# Altium integrated library Altium_PCB_Connector.IntLib: 246 symbols (part 2 of 5)
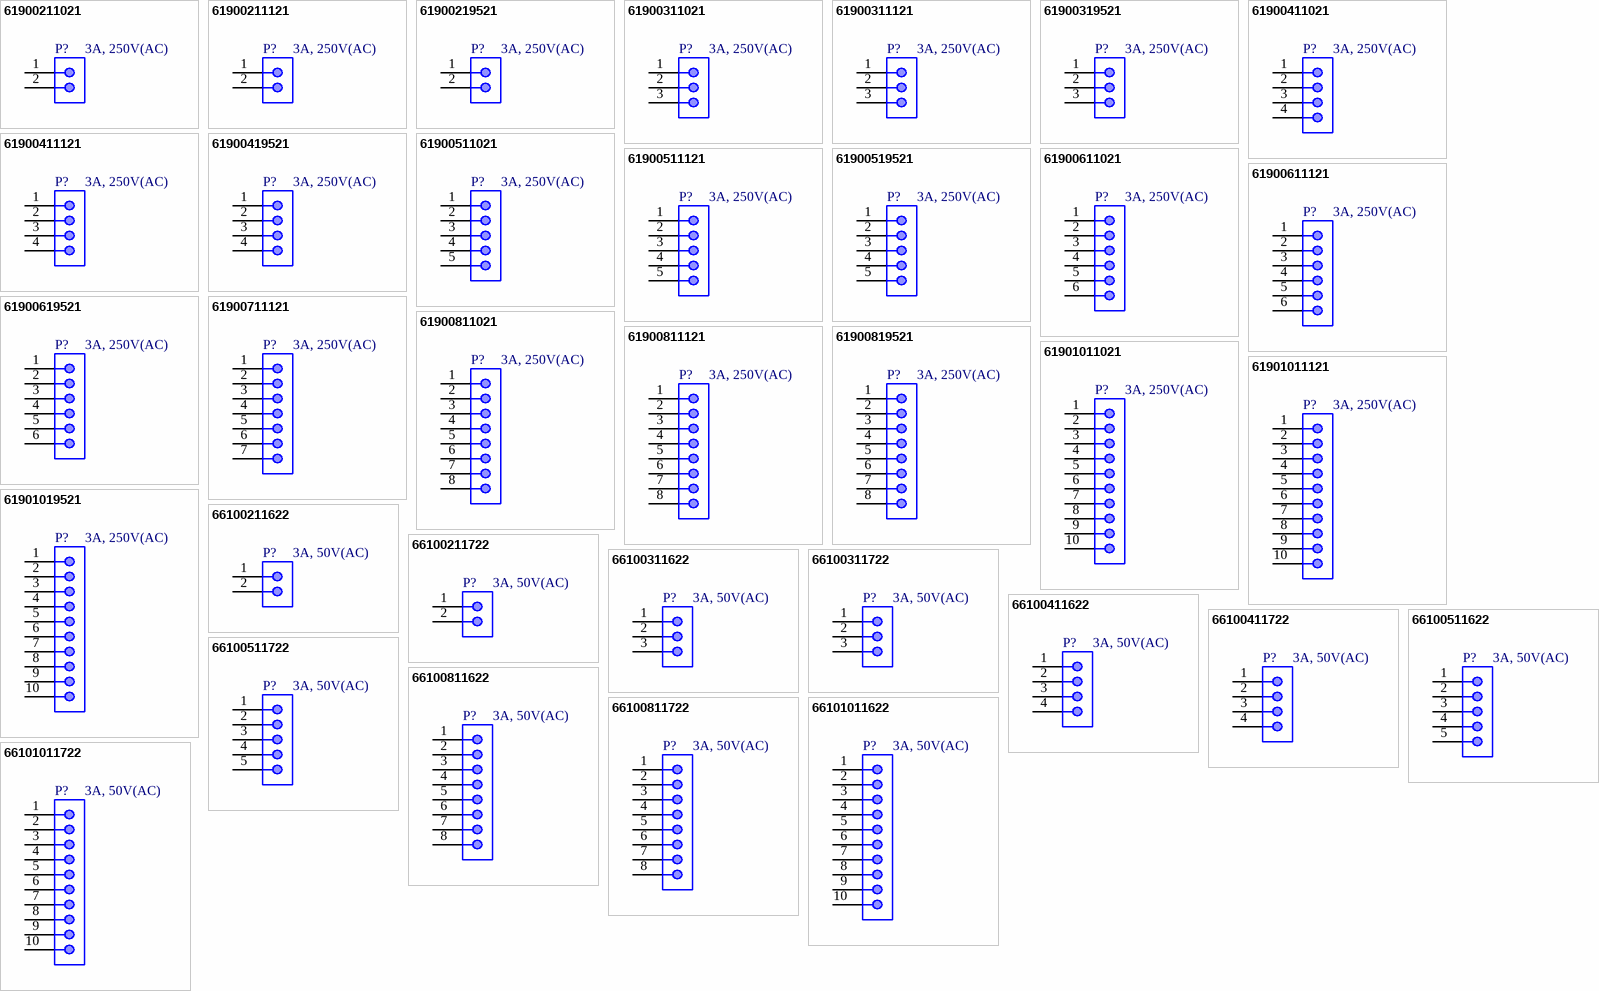
[diagram p10: symbols 61900211021 to 66101011722]

## 66101011722
designator P?, comment 3A, 50V(AC)
WR-WTB THT Male Right Angled Shrouded Header, pitch 2.54mm, 10p; Part Number: 66101011722; Manufacturer: Wurth Elektronik; Pin Number: 10; Contact Resistance: 20mOhm; Withstanding Voltage: 500VAC; Working Voltage: 50VAC; ComponentLink1Description: Datasheet; ComponentLink1URL: https://www.we-online.com/catalog/datasheet/66101011722.pdf; Pitch: 2.54mm; Packaging: Box; Gender: Male; Type: Right Angled; Rated Current: 3A; Supplier 1 URL: N/A; Supplier 2 URL: N/A; Supplier 3 URL: N/A; Value: 3A, 50V(AC); LCSC Part #: N/A; Manufacturer Part Number: 66101011722; Mount: THT; Operating Temperature Max: + 125 C; Operating Temperature Min: - 40 C; Package / Case: 10; Supplier 1: Mouser; Supplier 1 Part Number: N/A; Supplier 2: Digi-Key; Supplier 2 Part Number: N/A; Supplier 3: thegioiic; Supplier 3 Part Number: N/A
footprint 66101011722
pins: 1, 2, 3, 4, 5, 6, 7, 8, 9, 10


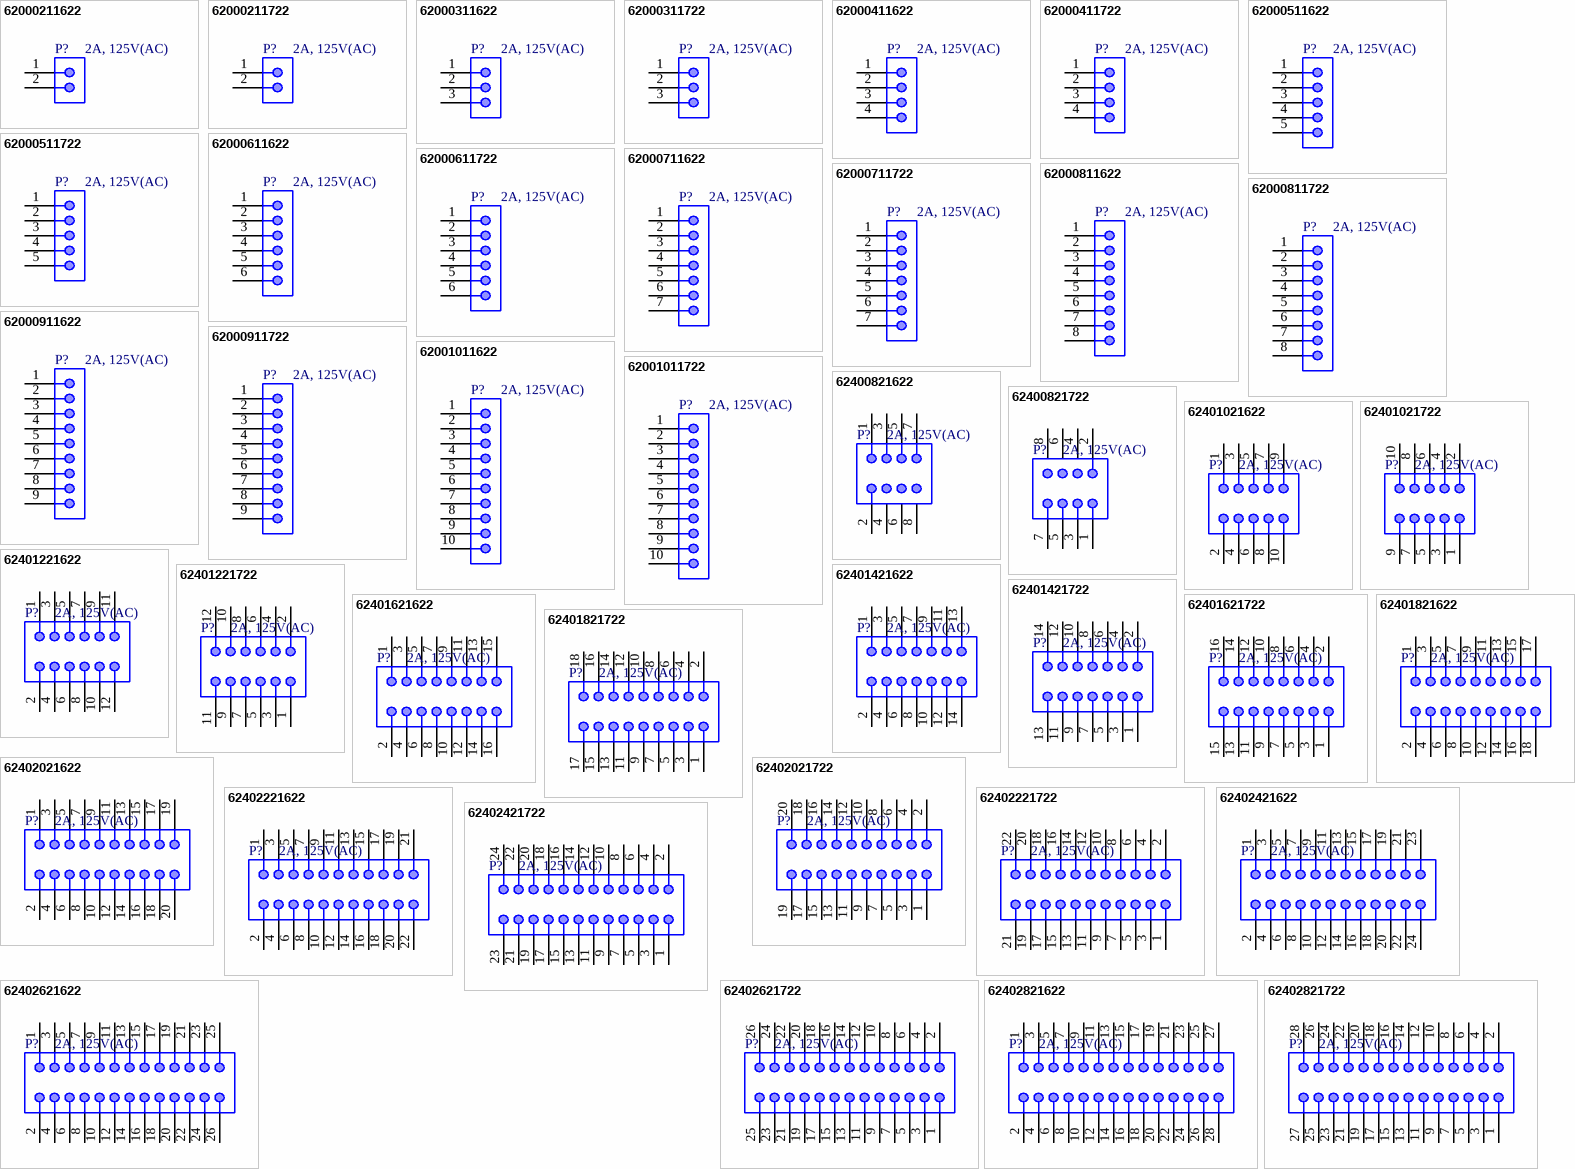
[diagram p2: symbols 62000211622 to 62402821722]

## 62000211622
designator P?, comment 2A, 125V(AC)
WR-WTB Male Vertical Shrouded Header, pitch 2mm, 2p; Part Number: 62000211622; Manufacturer: Wurth Elektronik; Pin Number: 2; Contact Resistance: 20mOhm; Withstanding Voltage: 800VAC; Working Voltage: 125VAC; ComponentLink1Description: Datasheet; ComponentLink1URL: https://www.we-online.com/catalog/datasheet/62000211622.pdf; Pitch: 2mm; Packaging: Bag; Gender: Male; Type: Vertical; Rated Current: 2A; Supplier 1 URL: https://www.mouser.vn/ProductDetail/Wurth-Elektronik/62000211622?qs=ulEaXIWI0c90wrFEMj4Fiw%3D%3D; Supplier 2 URL: N/A; Supplier 3 URL: https://www.thegioiic.com/dau-ph-2-0mm-2-chan-thang-xuyen-lo; Value: 2A, 125V(AC); LCSC Part #: N/A; Manufacturer Part Number: 62000211622; Mount: THT; Operating Temperature Max: + 85 C; Operating Temperature Min: - 25 C; Package / Case: 2; Supplier 1: Mouser; Supplier 1 Part Number: 710-62000211622; Supplier 2: Digi-Key; Supplier 2 Part Number: N/A; Supplier 3: thegioiic; Supplier 3 Part Number: N/A
footprint 62000211622
pins: 1, 2

## 62000211722
designator P?, comment 2A, 125V(AC)
WR-WTB THT Male Horizontal Shrouded Header, pitch 2mm, 2p; Part Number: 62000211722; Manufacturer: Wurth Elektronik; Pin Number: 2; Contact Resistance: 20mOhm; Withstanding Voltage: 800VAC; Working Voltage: 125VAC; ComponentLink1Description: Datasheet; ComponentLink1URL: https://www.we-online.com/catalog/datasheet/62000211722.pdf; Pitch: 2mm; Packaging: Bag; Gender: Male; Type: Horizontal; Rated Current: 2A; Supplier 1 URL: https://www.mouser.vn/ProductDetail/Wurth-Elektronik/62000211722?qs=ulEaXIWI0c%2FMXJYVzM5zuA%3D%3D; Supplier 2 URL: N/A; Supplier 3 URL: https://www.thegioiic.com/dau-ph-2-0mm-2-chan-cong-xuyen-lo; Value: 2A, 125V(AC); LCSC Part #: N/A; Manufacturer Part Number: 62000211722; Mount: THT; Operating Temperature Max: + 85 C; Operating Temperature Min: - 25 C; Package / Case: 2; Supplier 1: Mouser; Supplier 1 Part Number: 710-62000211722; Supplier 2: Digi-Key; Supplier 2 Part Number: N/A; Supplier 3: thegioiic; Supplier 3 Part Number: N/A
footprint 62000211722
pins: 1, 2

## 62000311622
designator P?, comment 2A, 125V(AC)
WR-WTB Male Vertical Shrouded Header, pitch 2mm, 3p; Part Number: 62000311622; Manufacturer: Wurth Elektronik; Pin Number: 3; Contact Resistance: 20mOhm; Withstanding Voltage: 800VAC; Working Voltage: 125VAC; ComponentLink1Description: Datasheet; ComponentLink1URL: https://www.we-online.com/catalog/datasheet/62000311622.pdf; Pitch: 2mm; Packaging: Bag; Gender: Male; Type: Vertical; Rated Current: 2A; Supplier 1 URL: N/A; Supplier 2 URL: N/A; Supplier 3 URL: https://www.thegioiic.com/dau-ph-2-0mm-3-chan-thang-xuyen-lo; Value: 2A, 125V(AC); LCSC Part #: N/A; Manufacturer Part Number: 62000311622; Mount: THT; Operating Temperature Max: + 85 C; Operating Temperature Min: - 25 C; Package / Case: 3; Supplier 1: Mouser; Supplier 1 Part Number: N/A; Supplier 2: Digi-Key; Supplier 2 Part Number: N/A; Supplier 3: thegioiic; Supplier 3 Part Number: N/A
footprint 62000311622
pins: 1, 2, 3

## 62000311722
designator P?, comment 2A, 125V(AC)
WR-WTB THT Male Horizontal Shrouded Header, pitch 2mm, 3p; Part Number: 62000311722; Manufacturer: Wurth Elektronik; Pin Number: 3; Contact Resistance: 20mOhm; Withstanding Voltage: 800VAC; Working Voltage: 125VAC; ComponentLink1Description: Datasheet; ComponentLink1URL: https://www.we-online.com/catalog/datasheet/62000311722.pdf; Pitch: 2mm; Packaging: Bag; Gender: Male; Type: Horizontal; Rated Current: 2A; Supplier 1 URL: N/A; Supplier 2 URL: N/A; Supplier 3 URL: N/A; Value: 2A, 125V(AC); LCSC Part #: N/A; Manufacturer Part Number: 62000311722; Mount: THT; Operating Temperature Max: + 85 C; Operating Temperature Min: - 25 C; Package / Case: 3; Supplier 1: Mouser; Supplier 1 Part Number: N/A; Supplier 2: Digi-Key; Supplier 2 Part Number: N/A; Supplier 3: thegioiic; Supplier 3 Part Number: N/A
footprint 62000311722
pins: 1, 2, 3

## 62000411622
designator P?, comment 2A, 125V(AC)
WR-WTB Male Vertical Shrouded Header, pitch 2mm, 4p; Part Number: 62000411622; Manufacturer: Wurth Elektronik; Pin Number: 4; Contact Resistance: 20mOhm; Withstanding Voltage: 800VAC; Working Voltage: 125VAC; ComponentLink1Description: Datasheet; ComponentLink1URL: https://www.we-online.com/catalog/datasheet/62000411622.pdf; Pitch: 2mm; Packaging: Bag; Gender: Male; Type: Vertical; Rated Current: 2A; Supplier 1 URL: https://www.mouser.vn/ProductDetail/Wurth-Elektronik/62000411622?qs=ulEaXIWI0c97uq7y%2F9KZdA%3D%3D; Supplier 2 URL: N/A; Supplier 3 URL: https://www.thegioiic.com/dau-ph-2-0mm-4-chan-thang-xuyen-lo; Value: 2A, 125V(AC); LCSC Part #: N/A; Manufacturer Part Number: 62000411622; Mount: THT; Operating Temperature Max: + 85 C; Operating Temperature Min: - 25 C; Package / Case: 4; Supplier 1: Mouser; Supplier 1 Part Number: 710-62000411622; Supplier 2: Digi-Key; Supplier 2 Part Number: N/A; Supplier 3: thegioiic; Supplier 3 Part Number: N/A
footprint 62000411622
pins: 1, 2, 3, 4

## 62000411722
designator P?, comment 2A, 125V(AC)
WR-WTB THT Male Horizontal Shrouded Header, pitch 2mm, 4p; Part Number: 62000411722; Manufacturer: Wurth Elektronik; Pin Number: 4; Contact Resistance: 20mOhm; Withstanding Voltage: 800VAC; Working Voltage: 125VAC; ComponentLink1Description: Datasheet; ComponentLink1URL: https://www.we-online.com/catalog/datasheet/62000411722.pdf; Pitch: 2mm; Packaging: Bag; Gender: Male; Type: Horizontal; Rated Current: 2A; Supplier 1 URL: https://www.mouser.vn/ProductDetail/Wurth-Elektronik/62000411722?qs=ulEaXIWI0c%2FFrQs6mYW8Wg%3D%3D; Supplier 2 URL: N/A; Supplier 3 URL: https://www.thegioiic.com/dau-ph-2-0mm-4-chan-cong-xuyen-lo; Value: 2A, 125V(AC); LCSC Part #: N/A; Manufacturer Part Number: 62000411722; Mount: THT; Operating Temperature Max: + 85 C; Operating Temperature Min: - 25 C; Package / Case: 4; Supplier 1: Mouser; Supplier 1 Part Number: 710-62000411722; Supplier 2: Digi-Key; Supplier 2 Part Number: N/A; Supplier 3: thegioiic; Supplier 3 Part Number: N/A
footprint 62000411722
pins: 1, 2, 3, 4

## 62000511622
designator P?, comment 2A, 125V(AC)
WR-WTB Male Vertical Shrouded Header, pitch 2mm, 5p; Part Number: 62000511622; Manufacturer: Wurth Elektronik; Pin Number: 5; Contact Resistance: 20mOhm; Withstanding Voltage: 800VAC; Working Voltage: 125VAC; ComponentLink1Description: Datasheet; ComponentLink1URL: https://www.we-online.com/catalog/datasheet/62000511622.pdf; Pitch: 2mm; Packaging: Bag; Gender: Male; Type: Vertical; Rated Current: 2A; Supplier 1 URL: https://www.mouser.vn/ProductDetail/Wurth-Elektronik/62000511622?qs=3Rah4i%252BhyCFehkQcqJWmLQ%3D%3D; Supplier 2 URL: N/A; Supplier 3 URL: https://www.thegioiic.com/dau-ph-2-0mm-5-chan-thang-xuyen-lo; Value: 2A, 125V(AC); LCSC Part #: N/A; Manufacturer Part Number: 62000511622; Mount: THT; Operating Temperature Max: + 85 C; Operating Temperature Min: - 25 C; Package / Case: 5; Supplier 1: Mouser; Supplier 1 Part Number: 710-62000511622; Supplier 2: Digi-Key; Supplier 2 Part Number: N/A; Supplier 3: thegioiic; Supplier 3 Part Number: N/A
footprint 62000511622
pins: 1, 2, 3, 4, 5

## 62000511722
designator P?, comment 2A, 125V(AC)
WR-WTB THT Male Horizontal Shrouded Header, pitch 2mm, 5p; Part Number: 62000511722; Manufacturer: Wurth Elektronik; Pin Number: 5; Contact Resistance: 20mOhm; Withstanding Voltage: 800VAC; Working Voltage: 125VAC; ComponentLink1Description: Datasheet; ComponentLink1URL: https://www.we-online.com/catalog/datasheet/62000511722.pdf; Pitch: 2mm; Packaging: Bag; Gender: Male; Type: Horizontal; Rated Current: 2A; Supplier 1 URL: N/A; Supplier 2 URL: N/A; Supplier 3 URL: https://www.thegioiic.com/dau-ph-2-0mm-5-chan-cong-xuyen-lo; Value: 2A, 125V(AC); LCSC Part #: N/A; Manufacturer Part Number: 62000511722; Mount: THT; Operating Temperature Max: + 85 C; Operating Temperature Min: - 25 C; Package / Case: 5; Supplier 1: Mouser; Supplier 1 Part Number: N/A; Supplier 2: Digi-Key; Supplier 2 Part Number: N/A; Supplier 3: thegioiic; Supplier 3 Part Number: N/A
footprint 62000511722
pins: 1, 2, 3, 4, 5

## 62000611622
designator P?, comment 2A, 125V(AC)
WR-WTB Male Vertical Shrouded Header, pitch 2mm, 6p; Part Number: 62000611622; Manufacturer: Wurth Elektronik; Pin Number: 6; Contact Resistance: 20mOhm; Withstanding Voltage: 800VAC; Working Voltage: 125VAC; ComponentLink1Description: Datasheet; ComponentLink1URL: https://www.we-online.com/catalog/datasheet/62000611622.pdf; Pitch: 2mm; Packaging: Bag; Gender: Male; Type: Vertical; Rated Current: 2A; Supplier 1 URL: https://www.mouser.vn/ProductDetail/Wurth-Elektronik/62000611622?qs=ulEaXIWI0c%2F38WR3e0VejA%3D%3D; Supplier 2 URL: N/A; Supplier 3 URL: https://www.thegioiic.com/dau-ph-2-0mm-6-chan-thang-xuyen-lo; Value: 2A, 125V(AC); LCSC Part #: N/A; Manufacturer Part Number: 62000611622; Mount: THT; Operating Temperature Max: + 85 C; Operating Temperature Min: - 25 C; Package / Case: 6; Supplier 1: Mouser; Supplier 1 Part Number: 710-62000611622; Supplier 2: Digi-Key; Supplier 2 Part Number: N/A; Supplier 3: thegioiic; Supplier 3 Part Number: N/A
footprint 62000611622
pins: 1, 2, 3, 4, 5, 6

## 62000611722
designator P?, comment 2A, 125V(AC)
WR-WTB THT Male Horizontal Shrouded Header, pitch 2mm, 6p; Part Number: 62000611722; Manufacturer: Wurth Elektronik; Pin Number: 6; Contact Resistance: 20mOhm; Withstanding Voltage: 800VAC; Working Voltage: 125VAC; ComponentLink1Description: Datasheet; ComponentLink1URL: https://www.we-online.com/catalog/datasheet/62000611722.pdf; Pitch: 2mm; Packaging: Bag; Gender: Male; Type: Horizontal; Rated Current: 2A; Supplier 1 URL: N/A; Supplier 2 URL: N/A; Supplier 3 URL: https://www.thegioiic.com/dau-ph-2-0mm-6-chan-cong-xuyen-lo; Value: 2A, 125V(AC); LCSC Part #: N/A; Manufacturer Part Number: 62000611722; Mount: THT; Operating Temperature Max: + 85 C; Operating Temperature Min: - 25 C; Package / Case: 6; Supplier 1: Mouser; Supplier 1 Part Number: N/A; Supplier 2: Digi-Key; Supplier 2 Part Number: N/A; Supplier 3: thegioiic; Supplier 3 Part Number: N/A
footprint 62000611722
pins: 1, 2, 3, 4, 5, 6

## 62000711622
designator P?, comment 2A, 125V(AC)
WR-WTB Male Vertical Shrouded Header, pitch 2mm, 7p; Part Number: 62000711622; Manufacturer: Wurth Elektronik; Pin Number: 7; Contact Resistance: 20mOhm; Withstanding Voltage: 800VAC; Working Voltage: 125VAC; ComponentLink1Description: Datasheet; ComponentLink1URL: https://www.we-online.com/catalog/datasheet/62000711622.pdf; Pitch: 2mm; Packaging: Bag; Gender: Male; Type: Vertical; Rated Current: 2A; Supplier 1 URL: https://www.mouser.vn/ProductDetail/Wurth-Elektronik/62000711622?qs=Z52uPhvi9VgJa7P5UNe6QA%3D%3D; Supplier 2 URL: N/A; Supplier 3 URL: https://www.thegioiic.com/dau-ph-2-0mm-7-chan-thang-xuyen-lo; Value: 2A, 125V(AC); LCSC Part #: N/A; Manufacturer Part Number: 62000711622; Mount: THT; Operating Temperature Max: + 85 C; Operating Temperature Min: - 25 C; Package / Case: 7; Supplier 1: Mouser; Supplier 1 Part Number: 710-62000711622; Supplier 2: Digi-Key; Supplier 2 Part Number: N/A; Supplier 3: thegioiic; Supplier 3 Part Number: N/A
footprint 62000711622
pins: 1, 2, 3, 4, 5, 6, 7

## 62000711722
designator P?, comment 2A, 125V(AC)
WR-WTB THT Male Horizontal Shrouded Header, pitch 2mm, 7p; Part Number: 62000711722; Manufacturer: Wurth Elektronik; Pin Number: 7; Contact Resistance: 20mOhm; Withstanding Voltage: 800VAC; Working Voltage: 125VAC; ComponentLink1Description: Datasheet; ComponentLink1URL: https://www.we-online.com/catalog/datasheet/62000711722.pdf; Pitch: 2mm; Packaging: Bag; Gender: Male; Type: Horizontal; Rated Current: 2A; Supplier 1 URL: N/A; Supplier 2 URL: N/A; Supplier 3 URL: https://www.thegioiic.com/dau-ph-2-0mm-7-chan-cong-xuyen-lo; Value: 2A, 125V(AC); LCSC Part #: N/A; Manufacturer Part Number: 62000711722; Mount: THT; Operating Temperature Max: + 85 C; Operating Temperature Min: - 25 C; Package / Case: 7; Supplier 1: Mouser; Supplier 1 Part Number: N/A; Supplier 2: Digi-Key; Supplier 2 Part Number: N/A; Supplier 3: thegioiic; Supplier 3 Part Number: N/A
footprint 62000711722
pins: 1, 2, 3, 4, 5, 6, 7

## 62000811622
designator P?, comment 2A, 125V(AC)
WR-WTB Male Vertical Shrouded Header, pitch 2mm, 8p; Part Number: 62000811622; Manufacturer: Wurth Elektronik; Pin Number: 8; Contact Resistance: 20mOhm; Withstanding Voltage: 800VAC; Working Voltage: 125VAC; ComponentLink1Description: Datasheet; ComponentLink1URL: https://www.we-online.com/catalog/datasheet/62000811622.pdf; Pitch: 2mm; Packaging: Bag; Gender: Male; Type: Vertical; Rated Current: 2A; Supplier 1 URL: N/A; Supplier 2 URL: N/A; Supplier 3 URL: https://www.thegioiic.com/dau-ph-2-0mm-8-chan-thang-xuyen-lo; Value: 2A, 125V(AC); LCSC Part #: N/A; Manufacturer Part Number: 62000811622; Mount: THT; Operating Temperature Max: + 85 C; Operating Temperature Min: - 25 C; Package / Case: 8; Supplier 1: Mouser; Supplier 1 Part Number: N/A; Supplier 2: Digi-Key; Supplier 2 Part Number: N/A; Supplier 3: thegioiic; Supplier 3 Part Number: N/A
footprint 62000811622
pins: 1, 2, 3, 4, 5, 6, 7, 8

## 62000811722
designator P?, comment 2A, 125V(AC)
WR-WTB THT Male Horizontal Shrouded Header, pitch 2mm, 8p; Part Number: 62000811722; Manufacturer: Wurth Elektronik; Pin Number: 8; Contact Resistance: 20mOhm; Withstanding Voltage: 800VAC; Working Voltage: 125VAC; ComponentLink1Description: Datasheet; ComponentLink1URL: https://www.we-online.com/catalog/datasheet/62000811722.pdf; Pitch: 2mm; Packaging: Bag; Gender: Male; Type: Horizontal; Rated Current: 2A; Supplier 1 URL: N/A; Supplier 2 URL: N/A; Supplier 3 URL: https://www.thegioiic.com/dau-ph-2-0mm-8-chan-cong-xuyen-lo; Value: 2A, 125V(AC); LCSC Part #: N/A; Manufacturer Part Number: 62000811722; Mount: THT; Operating Temperature Max: + 85 C; Operating Temperature Min: - 25 C; Package / Case: 8; Supplier 1: Mouser; Supplier 1 Part Number: N/A; Supplier 2: Digi-Key; Supplier 2 Part Number: N/A; Supplier 3: thegioiic; Supplier 3 Part Number: N/A
footprint 62000811722
pins: 1, 2, 3, 4, 5, 6, 7, 8

## 62000911622
designator P?, comment 2A, 125V(AC)
WR-WTB Male Vertical Shrouded Header, pitch 2mm, 9p; Part Number: 62000911622; Manufacturer: Wurth Elektronik; Pin Number: 9; Contact Resistance: 20mOhm; Withstanding Voltage: 800VAC; Working Voltage: 125VAC; ComponentLink1Description: Datasheet; ComponentLink1URL: https://www.we-online.com/catalog/datasheet/62000911622.pdf; Pitch: 2mm; Packaging: Bag; Gender: Male; Type: Vertical; Rated Current: 2A; Supplier 1 URL: N/A; Supplier 2 URL: N/A; Supplier 3 URL: https://www.thegioiic.com/dau-ph-2-0mm-9-chan-thang-xuyen-lo; Value: 2A, 125V(AC); LCSC Part #: N/A; Manufacturer Part Number: 62000911622; Mount: THT; Operating Temperature Max: + 85 C; Operating Temperature Min: - 25 C; Package / Case: 9; Supplier 1: Mouser; Supplier 1 Part Number: N/A; Supplier 2: Digi-Key; Supplier 2 Part Number: N/A; Supplier 3: thegioiic; Supplier 3 Part Number: N/A
footprint 62000911622
pins: 1, 2, 3, 4, 5, 6, 7, 8, 9

## 62000911722
designator P?, comment 2A, 125V(AC)
WR-WTB THT Male Horizontal Shrouded Header, pitch 2mm, 9p; Part Number: 62000911722; Manufacturer: Wurth Elektronik; Pin Number: 9; Contact Resistance: 20mOhm; Withstanding Voltage: 800VAC; Working Voltage: 125VAC; ComponentLink1Description: Datasheet; ComponentLink1URL: https://www.we-online.com/catalog/datasheet/62000911722.pdf; Pitch: 2mm; Packaging: Bag; Gender: Male; Type: Horizontal; Rated Current: 2A; Supplier 1 URL: N/A; Supplier 2 URL: N/A; Supplier 3 URL: https://www.thegioiic.com/dau-ph-2-0mm-9-chan-cong-xuyen-lo; Value: 2A, 125V(AC); LCSC Part #: N/A; Manufacturer Part Number: 62000911722; Mount: THT; Operating Temperature Max: + 85 C; Operating Temperature Min: - 25 C; Package / Case: 9; Supplier 1: Mouser; Supplier 1 Part Number: N/A; Supplier 2: Digi-Key; Supplier 2 Part Number: N/A; Supplier 3: thegioiic; Supplier 3 Part Number: N/A
footprint 62000911722
pins: 1, 2, 3, 4, 5, 6, 7, 8, 9

## 62001011622
designator P?, comment 2A, 125V(AC)
WR-WTB Male Vertical Shrouded Header, pitch 2mm, 10p; Part Number: 62001011622; Manufacturer: Wurth Elektronik; Pin Number: 10; Contact Resistance: 20mOhm; Withstanding Voltage: 800VAC; Working Voltage: 125VAC; ComponentLink1Description: Datasheet; ComponentLink1URL: https://www.we-online.com/catalog/datasheet/62001011622.pdf; Pitch: 2mm; Packaging: Bag; Gender: Male; Type: Vertical; Rated Current: 2A; Supplier 1 URL: N/A; Supplier 2 URL: N/A; Supplier 3 URL: https://www.thegioiic.com/dau-ph-2-0mm-10-chan-thang-xuyen-lo; Value: 2A, 125V(AC); LCSC Part #: N/A; Manufacturer Part Number: 62001011622; Mount: THT; Operating Temperature Max: + 85 C; Operating Temperature Min: - 25 C; Package / Case: 10; Supplier 1: Mouser; Supplier 1 Part Number: N/A; Supplier 2: Digi-Key; Supplier 2 Part Number: N/A; Supplier 3: thegioiic; Supplier 3 Part Number: N/A
footprint 62001011622
pins: 1, 2, 3, 4, 5, 6, 7, 8, 9, 10

## 62001011722
designator P?, comment 2A, 125V(AC)
WR-WTB THT Male Horizontal Shrouded Header, pitch 2mm, 10p; Part Number: 62001011722; Manufacturer: Wurth Elektronik; Pin Number: 10; Contact Resistance: 20mOhm; Withstanding Voltage: 800VAC; Working Voltage: 125VAC; ComponentLink1Description: Datasheet; ComponentLink1URL: https://www.we-online.com/catalog/datasheet/62001011722.pdf; Pitch: 2mm; Packaging: Bag; Gender: Male; Type: Horizontal; Rated Current: 2A; Supplier 1 URL: N/A; Supplier 2 URL: N/A; Supplier 3 URL: https://www.thegioiic.com/dau-ph-2-0mm-10-chan-cong-xuyen-lo; Value: 2A, 125V(AC); LCSC Part #: N/A; Manufacturer Part Number: 62001011722; Mount: THT; Operating Temperature Max: + 85 C; Operating Temperature Min: - 25 C; Package / Case: 10; Supplier 1: Mouser; Supplier 1 Part Number: N/A; Supplier 2: Digi-Key; Supplier 2 Part Number: N/A; Supplier 3: thegioiic; Supplier 3 Part Number: N/A
footprint 62001011722
pins: 1, 2, 3, 4, 5, 6, 7, 8, 9, 10

## 62400821622
designator P?, comment 2A, 125V(AC)
WR-WTB THT Male Vertical Shrouded Header with positive locking, Dual Row, pitch 2mm, 8p; Part Number: 62400821622; Manufacturer: Wurth Elektronik; Pin Number: 8; Contact Resistance: 20mOhm; Rated Current: 3A; Withstanding Voltage: 1000VAC; Working Voltage: 250VAC; ComponentLink1Description: Datasheet; ComponentLink1URL: https://www.we-online.com/catalog/datasheet/62400821622.pdf; Pitch: 2mm; Packaging: Tube; Gender: Male; Type: Vertical; Supplier 1 URL: https://www.mouser.vn/ProductDetail/Wurth-Elektronik/62400821622?qs=E2PpAYvlWVs2unmT4kcZAA%3D%3D; Supplier 2 URL: N/A; Supplier 3 URL: N/A; Value: 2A, 125V(AC); LCSC Part #: N/A; Manufacturer Part Number: 62400821622; Mount: THT; Operating Temperature Max: + 85 C; Operating Temperature Min: - 25 C; Package / Case: 8; Supplier 1: Mouser; Supplier 1 Part Number: 710-62400821622; Supplier 2: Digi-Key; Supplier 2 Part Number: N/A; Supplier 3: thegioiic; Supplier 3 Part Number: N/A
footprint 62400821622
pins: 1, 2, 3, 4, 5, 6, 7, 8

## 62400821722
designator P?, comment 2A, 125V(AC)
WR-WTB THT Male Horizontal Shrouded Header with positive locking, Dual Row, pitch 2mm, 8p; Part Number: 62400821722; Manufacturer: Wurth Elektronik; Pin Number: 8; Contact Resistance: 20mOhm; Rated Current: 3A; Withstanding Voltage: 1000VAC; Working Voltage: 250VAC; ComponentLink1Description: Datasheet; ComponentLink1URL: https://www.we-online.com/catalog/datasheet/62400821722.pdf; Pitch: 2mm; Packaging: Tube; Gender: Male; Type: Horizontal; Supplier 1 URL: https://www.mouser.vn/ProductDetail/Wurth-Elektronik/62400821722?qs=E2PpAYvlWVtG7MddBPiHNA%3D%3D; Supplier 2 URL: N/A; Supplier 3 URL: N/A; Value: 2A, 125V(AC); LCSC Part #: N/A; Manufacturer Part Number: 62400821722; Mount: THT; Operating Temperature Max: + 85 C; Operating Temperature Min: - 25 C; Package / Case: 8; Supplier 1: Mouser; Supplier 1 Part Number: 710-62400821722; Supplier 2: Digi-Key; Supplier 2 Part Number: N/A; Supplier 3: thegioiic; Supplier 3 Part Number: N/A
footprint 62400821722
pins: 1, 2, 3, 4, 5, 6, 7, 8

## 62401021622
designator P?, comment 2A, 125V(AC)
WR-WTB THT Male Vertical Shrouded Header with positive locking, Dual Row, pitch 2mm, 10p; Part Number: 62401021622; Manufacturer: Wurth Elektronik; Pin Number: 10; Contact Resistance: 20mOhm; Rated Current: 3A; Withstanding Voltage: 1000VAC; Working Voltage: 250VAC; ComponentLink1Description: Datasheet; ComponentLink1URL: https://www.we-online.com/catalog/datasheet/62401021622.pdf; Pitch: 2mm; Packaging: Tube; Gender: Male; Type: Vertical; Supplier 1 URL: https://www.mouser.vn/ProductDetail/Wurth-Elektronik/62401021622?qs=2kOmHSv6VfTyOTj9tm7OwQ%3D%3D; Supplier 2 URL: N/A; Supplier 3 URL: N/A; Value: 2A, 125V(AC); LCSC Part #: N/A; Manufacturer Part Number: 62401021622; Mount: THT; Operating Temperature Max: + 85 C; Operating Temperature Min: - 25 C; Package / Case: 10; Supplier 1: Mouser; Supplier 1 Part Number: 710-62401021622; Supplier 2: Digi-Key; Supplier 2 Part Number: N/A; Supplier 3: thegioiic; Supplier 3 Part Number: N/A
footprint 62401021622
pins: 1, 2, 3, 4, 5, 6, 7, 8, 9, 10

## 62401021722
designator P?, comment 2A, 125V(AC)
WR-WTB THT Male Horizontal Shrouded Header with positive locking, Dual Row, pitch 2mm, 10p; Part Number: 62401021722; Manufacturer: Wurth Elektronik; Pin Number: 10; Contact Resistance: 20mOhm; Rated Current: 3A; Withstanding Voltage: 1000VAC; Working Voltage: 250VAC; ComponentLink1Description: Datasheet; ComponentLink1URL: https://www.we-online.com/catalog/datasheet/62401021722.pdf; Pitch: 2mm; Packaging: Tube; Gender: Male; Type: Horizontal; Supplier 1 URL: https://www.mouser.vn/ProductDetail/Wurth-Elektronik/62401021722?qs=E2PpAYvlWVt1BydIyo7tzQ%3D%3D; Supplier 2 URL: N/A; Supplier 3 URL: N/A; Value: 2A, 125V(AC); LCSC Part #: N/A; Manufacturer Part Number: 62401021722; Mount: THT; Operating Temperature Max: + 85 C; Operating Temperature Min: - 25 C; Package / Case: 10; Supplier 1: Mouser; Supplier 1 Part Number: 710-62401021722; Supplier 2: Digi-Key; Supplier 2 Part Number: N/A; Supplier 3: thegioiic; Supplier 3 Part Number: N/A
footprint 62401021722
pins: 1, 2, 3, 4, 5, 6, 7, 8, 9, 10

## 62401221622
designator P?, comment 2A, 125V(AC)
WR-WTB THT Male Vertical Shrouded Header with positive locking, Dual Row, pitch 2mm, 12p; Part Number: 62401221622; Manufacturer: Wurth Elektronik; Pin Number: 12; Contact Resistance: 20mOhm; Rated Current: 3A; Withstanding Voltage: 1000VAC; Working Voltage: 250VAC; ComponentLink1Description: Datasheet; ComponentLink1URL: https://www.we-online.com/catalog/datasheet/62401221622.pdf; Pitch: 2mm; Packaging: Tube; Gender: Male; Type: Vertical; Supplier 1 URL: https://www.mouser.vn/ProductDetail/Wurth-Elektronik/62401221622?qs=E2PpAYvlWVtzKxOWY%2FcdIw%3D%3D; Supplier 2 URL: N/A; Supplier 3 URL: N/A; Value: 2A, 125V(AC); LCSC Part #: N/A; Manufacturer Part Number: 62401221622; Mount: THT; Operating Temperature Max: + 85 C; Operating Temperature Min: - 25 C; Package / Case: 12; Supplier 1: Mouser; Supplier 1 Part Number: 710-62401221622; Supplier 2: Digi-Key; Supplier 2 Part Number: N/A; Supplier 3: thegioiic; Supplier 3 Part Number: N/A
footprint 62401221622
pins: 1, 2, 3, 4, 5, 6, 7, 8, 9, 10, 11, 12

## 62401221722
designator P?, comment 2A, 125V(AC)
WR-WTB THT Male Horizontal Shrouded Header with positive locking, Dual Row, pitch 2mm, 12p; Part Number: 62401221722; Manufacturer: Wurth Elektronik; Pin Number: 12; Contact Resistance: 20mOhm; Rated Current: 3A; Withstanding Voltage: 1000VAC; Working Voltage: 250VAC; ComponentLink1Description: Datasheet; ComponentLink1URL: https://www.we-online.com/catalog/datasheet/62401221722.pdf; Pitch: 2mm; Packaging: Tube; Gender: Male; Type: Horizontal; Supplier 1 URL: https://www.mouser.vn/ProductDetail/Wurth-Elektronik/62401221722?qs=E2PpAYvlWVtOXg4nBTiZww%3D%3D; Supplier 2 URL: N/A; Supplier 3 URL: N/A; Value: 2A, 125V(AC); LCSC Part #: N/A; Manufacturer Part Number: 62401221722; Mount: THT; Operating Temperature Max: + 85 C; Operating Temperature Min: - 25 C; Package / Case: 12; Supplier 1: Mouser; Supplier 1 Part Number: 710-62401221722; Supplier 2: Digi-Key; Supplier 2 Part Number: N/A; Supplier 3: thegioiic; Supplier 3 Part Number: N/A
footprint 62401221722
pins: 1, 2, 3, 4, 5, 6, 7, 8, 9, 10, 11, 12

## 62401421622
designator P?, comment 2A, 125V(AC)
WR-WTB THT Male Vertical Shrouded Header with positive locking, Dual Row, pitch 2mm, 14p; Part Number: 62401421622; Manufacturer: Wurth Elektronik; Pin Number: 14; Contact Resistance: 20mOhm; Rated Current: 3A; Withstanding Voltage: 1000VAC; Working Voltage: 250VAC; ComponentLink1Description: Datasheet; ComponentLink1URL: https://www.we-online.com/catalog/datasheet/62401421622.pdf; Pitch: 2mm; Packaging: Tube; Gender: Male; Type: Vertical; Supplier 1 URL: https://www.mouser.vn/ProductDetail/Wurth-Elektronik/62401421622?qs=E2PpAYvlWVtqgqemf6MSDA%3D%3D; Supplier 2 URL: N/A; Supplier 3 URL: N/A; Value: 2A, 125V(AC); LCSC Part #: N/A; Manufacturer Part Number: 62401421622; Mount: THT; Operating Temperature Max: + 85 C; Operating Temperature Min: - 25 C; Package / Case: 14; Supplier 1: Mouser; Supplier 1 Part Number: 710-62401421622; Supplier 2: Digi-Key; Supplier 2 Part Number: N/A; Supplier 3: thegioiic; Supplier 3 Part Number: N/A
footprint 62401421622
pins: 1, 2, 3, 4, 5, 6, 7, 8, 9, 10, 11, 12, 13, 14

## 62401421722
designator P?, comment 2A, 125V(AC)
WR-WTB THT Male Horizontal Shrouded Header with positive locking, Dual Row, pitch 2mm, 14p; Part Number: 62401421722; Manufacturer: Wurth Elektronik; Pin Number: 14; Contact Resistance: 20mOhm; Rated Current: 3A; Withstanding Voltage: 1000VAC; Working Voltage: 250VAC; ComponentLink1Description: Datasheet; ComponentLink1URL: https://www.we-online.com/catalog/datasheet/62401421722.pdf; Pitch: 2mm; Packaging: Tube; Gender: Male; Type: Horizontal; Supplier 1 URL: https://www.mouser.vn/ProductDetail/Wurth-Elektronik/62401421722?qs=E2PpAYvlWVv%252BKQvrHHK3%2Fg%3D%3D; Supplier 2 URL: N/A; Supplier 3 URL: N/A; Value: 2A, 125V(AC); LCSC Part #: N/A; Manufacturer Part Number: 62401421722; Mount: THT; Operating Temperature Max: + 85 C; Operating Temperature Min: - 25 C; Package / Case: 14; Supplier 1: Mouser; Supplier 1 Part Number: 710-62401421722; Supplier 2: Digi-Key; Supplier 2 Part Number: N/A; Supplier 3: thegioiic; Supplier 3 Part Number: N/A
footprint 62401421722
pins: 1, 2, 3, 4, 5, 6, 7, 8, 9, 10, 11, 12, 13, 14

## 62401621622
designator P?, comment 2A, 125V(AC)
WR-WTB THT Male Vertical Shrouded Header with positive locking, Dual Row, pitch 2mm, 16p; Part Number: 62401621622; Manufacturer: Wurth Elektronik; Pin Number: 16; Contact Resistance: 20mOhm; Rated Current: 3A; Withstanding Voltage: 1000VAC; Working Voltage: 250VAC; ComponentLink1Description: Datasheet; ComponentLink1URL: https://www.we-online.com/catalog/datasheet/62401621622.pdf; Pitch: 2mm; Packaging: Tube; Gender: Male; Type: Vertical; Supplier 1 URL: https://www.mouser.vn/ProductDetail/Wurth-Elektronik/62401621622?qs=2kOmHSv6VfRxCf2khhpPeQ%3D%3D; Supplier 2 URL: N/A; Supplier 3 URL: N/A; Value: 2A, 125V(AC); LCSC Part #: N/A; Manufacturer Part Number: 62401621622; Mount: THT; Operating Temperature Max: + 85 C; Operating Temperature Min: - 25 C; Package / Case: 16; Supplier 1: Mouser; Supplier 1 Part Number: 710-62401621622; Supplier 2: Digi-Key; Supplier 2 Part Number: N/A; Supplier 3: thegioiic; Supplier 3 Part Number: N/A
footprint 62401621622
pins: 1, 2, 3, 4, 5, 6, 7, 8, 9, 10, 11, 12, 13, 14, 15, 16

## 62401621722
designator P?, comment 2A, 125V(AC)
WR-WTB THT Male Horizontal Shrouded Header with positive locking, Dual Row, pitch 2mm, 16p; Part Number: 62401621722; Manufacturer: Wurth Elektronik; Pin Number: 16; Contact Resistance: 20mOhm; Rated Current: 3A; Withstanding Voltage: 1000VAC; Working Voltage: 250VAC; ComponentLink1Description: Datasheet; ComponentLink1URL: https://www.we-online.com/catalog/datasheet/62401621722.pdf; Pitch: 2mm; Packaging: Tube; Gender: Male; Type: Horizontal; Supplier 1 URL: https://www.mouser.vn/ProductDetail/Wurth-Elektronik/62401621722?qs=E2PpAYvlWVvRXE%2FFvDFRow%3D%3D; Supplier 2 URL: N/A; Supplier 3 URL: N/A; Value: 2A, 125V(AC); LCSC Part #: N/A; Manufacturer Part Number: 62401621722; Mount: THT; Operating Temperature Max: + 85 C; Operating Temperature Min: - 25 C; Package / Case: 16; Supplier 1: Mouser; Supplier 1 Part Number: 710-62401621722; Supplier 2: Digi-Key; Supplier 2 Part Number: N/A; Supplier 3: thegioiic; Supplier 3 Part Number: N/A
footprint 62401621722
pins: 1, 2, 3, 4, 5, 6, 7, 8, 9, 10, 11, 12, 13, 14, 15, 16

## 62401821622
designator P?, comment 2A, 125V(AC)
WR-WTB THT Male Vertical Shrouded Header with positive locking, Dual Row, pitch 2mm, 18p; Part Number: 62401821622; Manufacturer: Wurth Elektronik; Pin Number: 18; Contact Resistance: 20mOhm; Rated Current: 3A; Withstanding Voltage: 1000VAC; Working Voltage: 250VAC; ComponentLink1Description: Datasheet; ComponentLink1URL: https://www.we-online.com/catalog/datasheet/62401821622.pdf; Pitch: 2mm; Packaging: Tube; Gender: Male; Type: Vertical; Supplier 1 URL: https://www.mouser.vn/ProductDetail/Wurth-Elektronik/62401821622?qs=E2PpAYvlWVvkaOLNzxVopg%3D%3D; Supplier 2 URL: N/A; Supplier 3 URL: N/A; Value: 2A, 125V(AC); LCSC Part #: N/A; Manufacturer Part Number: 62401821622; Mount: THT; Operating Temperature Max: + 85 C; Operating Temperature Min: - 25 C; Package / Case: 18; Supplier 1: Mouser; Supplier 1 Part Number: 710-62401821622; Supplier 2: Digi-Key; Supplier 2 Part Number: N/A; Supplier 3: thegioiic; Supplier 3 Part Number: N/A
footprint 62401821622
pins: 1, 2, 3, 4, 5, 6, 7, 8, 9, 10, 11, 12, 13, 14, 15, 16, 17, 18

## 62401821722
designator P?, comment 2A, 125V(AC)
WR-WTB THT Male Horizontal Shrouded Header with positive locking, Dual Row, pitch 2mm, 18p; Part Number: 62401821722; Manufacturer: Wurth Elektronik; Pin Number: 18; Contact Resistance: 20mOhm; Rated Current: 3A; Withstanding Voltage: 1000VAC; Working Voltage: 250VAC; ComponentLink1Description: Datasheet; ComponentLink1URL: https://www.we-online.com/catalog/datasheet/62401821722.pdf; Pitch: 2mm; Packaging: Tube; Gender: Male; Type: Horizontal; Supplier 1 URL: https://www.mouser.vn/ProductDetail/Wurth-Elektronik/62401821722?qs=E2PpAYvlWVu2hxjCWQy9bQ%3D%3D; Supplier 2 URL: N/A; Supplier 3 URL: N/A; Value: 2A, 125V(AC); LCSC Part #: N/A; Manufacturer Part Number: 62401821722; Mount: THT; Operating Temperature Max: + 85 C; Operating Temperature Min: - 25 C; Package / Case: 18; Supplier 1: Mouser; Supplier 1 Part Number: 710-62401821722; Supplier 2: Digi-Key; Supplier 2 Part Number: N/A; Supplier 3: thegioiic; Supplier 3 Part Number: N/A
footprint 62401821722
pins: 1, 2, 3, 4, 5, 6, 7, 8, 9, 10, 11, 12, 13, 14, 15, 16, 17, 18

## 62402021622
designator P?, comment 2A, 125V(AC)
WR-WTB THT Male Vertical Shrouded Header with positive locking, Dual Row, pitch 2mm, 20p; Part Number: 62402021622; Manufacturer: Wurth Elektronik; Pin Number: 20; Contact Resistance: 20mOhm; Rated Current: 3A; Withstanding Voltage: 1000VAC; Working Voltage: 250VAC; ComponentLink1Description: Datasheet; ComponentLink1URL: https://www.we-online.com/catalog/datasheet/62402021622.pdf; Pitch: 2mm; Packaging: Tube; Gender: Male; Type: Vertical; Supplier 1 URL: https://www.mouser.vn/ProductDetail/Wurth-Elektronik/62402021622?qs=E2PpAYvlWVv8kSSRPw9mNw%3D%3D; Supplier 2 URL: N/A; Supplier 3 URL: N/A; Value: 2A, 125V(AC); LCSC Part #: N/A; Manufacturer Part Number: 62402021622; Mount: THT; Operating Temperature Max: + 85 C; Operating Temperature Min: - 25 C; Package / Case: 20; Supplier 1: Mouser; Supplier 1 Part Number: 710-62402021622; Supplier 2: Digi-Key; Supplier 2 Part Number: N/A; Supplier 3: thegioiic; Supplier 3 Part Number: N/A
footprint 62402021622
pins: 1, 2, 3, 4, 5, 6, 7, 8, 9, 10, 11, 12, 13, 14, 15, 16, 17, 18, 19, 20

## 62402021722
designator P?, comment 2A, 125V(AC)
WR-WTB THT Male Horizontal Shrouded Header with positive locking, Dual Row, pitch 2mm, 20p; Part Number: 62402021722; Manufacturer: Wurth Elektronik; Pin Number: 20; Contact Resistance: 20mOhm; Rated Current: 3A; Withstanding Voltage: 1000VAC; Working Voltage: 250VAC; ComponentLink1Description: Datasheet; ComponentLink1URL: https://www.we-online.com/catalog/datasheet/62402021722.pdf; Pitch: 2mm; Packaging: Tube; Gender: Male; Type: Horizontal; Supplier 1 URL: https://www.mouser.vn/ProductDetail/Wurth-Elektronik/62402021722?qs=E2PpAYvlWVu2YNk7Qrqh5Q%3D%3D; Supplier 2 URL: N/A; Supplier 3 URL: N/A; Value: 2A, 125V(AC); LCSC Part #: N/A; Manufacturer Part Number: 62402021722; Mount: THT; Operating Temperature Max: + 85 C; Operating Temperature Min: - 25 C; Package / Case: 20; Supplier 1: Mouser; Supplier 1 Part Number: 710-62402021722; Supplier 2: Digi-Key; Supplier 2 Part Number: N/A; Supplier 3: thegioiic; Supplier 3 Part Number: N/A
footprint 62402021722
pins: 1, 2, 3, 4, 5, 6, 7, 8, 9, 10, 11, 12, 13, 14, 15, 16, 17, 18, 19, 20

## 62402221622
designator P?, comment 2A, 125V(AC)
WR-WTB THT Male Vertical Shrouded Header with positive locking, Dual Row, pitch 2mm, 22p; Part Number: 62402221622; Manufacturer: Wurth Elektronik; Pin Number: 22; Contact Resistance: 20mOhm; Rated Current: 3A; Withstanding Voltage: 1000VAC; Working Voltage: 250VAC; ComponentLink1Description: Datasheet; ComponentLink1URL: https://www.we-online.com/catalog/datasheet/62402221622.pdf; Pitch: 2mm; Packaging: Tube; Gender: Male; Type: Vertical; Supplier 1 URL: https://www.mouser.vn/ProductDetail/Wurth-Elektronik/62402221622?qs=E2PpAYvlWVtDGxljqrkKNw%3D%3D; Supplier 2 URL: N/A; Supplier 3 URL: N/A; Value: 2A, 125V(AC); LCSC Part #: N/A; Manufacturer Part Number: 62402221622; Mount: THT; Operating Temperature Max: + 85 C; Operating Temperature Min: - 25 C; Package / Case: 22; Supplier 1: Mouser; Supplier 1 Part Number: 710-62402221622; Supplier 2: Digi-Key; Supplier 2 Part Number: N/A; Supplier 3: thegioiic; Supplier 3 Part Number: N/A
footprint 62402221622
pins: 1, 2, 3, 4, 5, 6, 7, 8, 9, 10, 11, 12, 13, 14, 15, 16, 17, 18, 19, 20, 21, 22

## 62402221722
designator P?, comment 2A, 125V(AC)
WR-WTB THT Male Horizontal Shrouded Header with positive locking, Dual Row, pitch 2mm, 22p; Part Number: 62402221722; Manufacturer: Wurth Elektronik; Pin Number: 22; Contact Resistance: 20mOhm; Rated Current: 3A; Withstanding Voltage: 1000VAC; Working Voltage: 250VAC; ComponentLink1Description: Datasheet; ComponentLink1URL: https://www.we-online.com/catalog/datasheet/62402221722.pdf; Pitch: 2mm; Packaging: Tube; Gender: Male; Type: Horizontal; Supplier 1 URL: https://www.mouser.vn/ProductDetail/Wurth-Elektronik/62402221722?qs=E2PpAYvlWVtyqDTXHrgPXQ%3D%3D; Supplier 2 URL: N/A; Supplier 3 URL: N/A; Value: 2A, 125V(AC); LCSC Part #: N/A; Manufacturer Part Number: 62402221722; Mount: THT; Operating Temperature Max: + 85 C; Operating Temperature Min: - 25 C; Package / Case: 22; Supplier 1: Mouser; Supplier 1 Part Number: 710-62402221722; Supplier 2: Digi-Key; Supplier 2 Part Number: N/A; Supplier 3: thegioiic; Supplier 3 Part Number: N/A
footprint 62402221722
pins: 1, 2, 3, 4, 5, 6, 7, 8, 9, 10, 11, 12, 13, 14, 15, 16, 17, 18, 19, 20, 21, 22

## 62402421622
designator P?, comment 2A, 125V(AC)
WR-WTB THT Male Vertical Shrouded Header with positive locking, Dual Row, pitch 2mm, 24p; Part Number: 62402421622; Manufacturer: Wurth Elektronik; Pin Number: 24; Contact Resistance: 20mOhm; Rated Current: 3A; Withstanding Voltage: 1000VAC; Working Voltage: 250VAC; ComponentLink1Description: Datasheet; ComponentLink1URL: https://www.we-online.com/catalog/datasheet/62402421622.pdf; Pitch: 2mm; Packaging: Tube; Gender: Male; Type: Vertical; Supplier 1 URL: https://www.mouser.vn/ProductDetail/Wurth-Elektronik/62402421622?qs=2kOmHSv6VfRhYo9kVBRY3g%3D%3D; Supplier 2 URL: N/A; Supplier 3 URL: N/A; Value: 2A, 125V(AC); LCSC Part #: N/A; Manufacturer Part Number: 62402421622; Mount: THT; Operating Temperature Max: + 85 C; Operating Temperature Min: - 25 C; Package / Case: 24; Supplier 1: Mouser; Supplier 1 Part Number: 710-62402421622; Supplier 2: Digi-Key; Supplier 2 Part Number: N/A; Supplier 3: thegioiic; Supplier 3 Part Number: N/A
footprint 62402421622
pins: 1, 2, 3, 4, 5, 6, 7, 8, 9, 10, 11, 12, 13, 14, 15, 16, 17, 18, 19, 20, 21, 22, 23, 24

## 62402421722
designator P?, comment 2A, 125V(AC)
WR-WTB THT Male Horizontal Shrouded Header with positive locking, Dual Row, pitch 2mm, 24p; Part Number: 62402421722; Manufacturer: Wurth Elektronik; Pin Number: 24; Contact Resistance: 20mOhm; Rated Current: 3A; Withstanding Voltage: 1000VAC; Working Voltage: 250VAC; ComponentLink1Description: Datasheet; ComponentLink1URL: https://www.we-online.com/catalog/datasheet/62402421722.pdf; Pitch: 2mm; Packaging: Tube; Gender: Male; Type: Horizontal; Supplier 1 URL: https://www.mouser.vn/ProductDetail/Wurth-Elektronik/62402421722?qs=E2PpAYvlWVvbvo6YmSySiQ%3D%3D; Supplier 2 URL: N/A; Supplier 3 URL: N/A; Value: 2A, 125V(AC); LCSC Part #: N/A; Manufacturer Part Number: 62402421722; Mount: THT; Operating Temperature Max: + 85 C; Operating Temperature Min: - 25 C; Package / Case: 24; Supplier 1: Mouser; Supplier 1 Part Number: 710-62402421722; Supplier 2: Digi-Key; Supplier 2 Part Number: N/A; Supplier 3: thegioiic; Supplier 3 Part Number: N/A
footprint 62402421722
pins: 1, 2, 3, 4, 5, 6, 7, 8, 9, 10, 11, 12, 13, 14, 15, 16, 17, 18, 19, 20, 21, 22, 23, 24

## 62402621622
designator P?, comment 2A, 125V(AC)
WR-WTB THT Male Vertical Shrouded Header with positive locking, Dual Row, pitch 2mm, 26p; Part Number: 62402621622; Manufacturer: Wurth Elektronik; Pin Number: 26; Contact Resistance: 20mOhm; Rated Current: 3A; Withstanding Voltage: 1000VAC; Working Voltage: 250VAC; ComponentLink1Description: Datasheet; ComponentLink1URL: https://www.we-online.com/catalog/datasheet/62402621622.pdf; Pitch: 2mm; Packaging: Tube; Gender: Male; Type: Vertical; Supplier 1 URL: https://www.mouser.vn/ProductDetail/Wurth-Elektronik/62402421622?qs=2kOmHSv6VfRhYo9kVBRY3g%3D%3D; Supplier 2 URL: N/A; Supplier 3 URL: N/A; Value: 2A, 125V(AC); LCSC Part #: N/A; Manufacturer Part Number: 62402621622; Mount: THT; Operating Temperature Max: + 85 C; Operating Temperature Min: - 25 C; Package / Case: 26; Supplier 1: Mouser; Supplier 1 Part Number: 710-62402421622; Supplier 2: Digi-Key; Supplier 2 Part Number: N/A; Supplier 3: thegioiic; Supplier 3 Part Number: N/A
footprint 62402621622
pins: 1, 2, 3, 4, 5, 6, 7, 8, 9, 10, 11, 12, 13, 14, 15, 16, 17, 18, 19, 20, 21, 22, 23, 24, 25, 26

## 62402621722
designator P?, comment 2A, 125V(AC)
WR-WTB THT Male Horizontal Shrouded Header with positive locking, Dual Row, pitch 2mm, 26p; Part Number: 62402621722; Manufacturer: Wurth Elektronik; Pin Number: 26; Contact Resistance: 20mOhm; Rated Current: 3A; Withstanding Voltage: 1000VAC; Working Voltage: 250VAC; ComponentLink1Description: Datasheet; ComponentLink1URL: https://www.we-online.com/catalog/datasheet/62402621722.pdf; Pitch: 2mm; Packaging: Tube; Gender: Male; Type: Horizontal; Supplier 1 URL: https://www.mouser.vn/ProductDetail/Wurth-Elektronik/62402621722?qs=E2PpAYvlWVtxgm9luf8cXA%3D%3D; Supplier 2 URL: N/A; Supplier 3 URL: N/A; Value: 2A, 125V(AC); LCSC Part #: N/A; Manufacturer Part Number: 62402621722; Mount: THT; Operating Temperature Max: + 85 C; Operating Temperature Min: - 25 C; Package / Case: 26; Supplier 1: Mouser; Supplier 1 Part Number: 710-62402621722; Supplier 2: Digi-Key; Supplier 2 Part Number: N/A; Supplier 3: thegioiic; Supplier 3 Part Number: N/A
footprint 62402621722
pins: 1, 2, 3, 4, 5, 6, 7, 8, 9, 10, 11, 12, 13, 14, 15, 16, 17, 18, 19, 20, 21, 22, 23, 24, 25, 26

## 62402821622
designator P?, comment 2A, 125V(AC)
WR-WTB THT Male Vertical Shrouded Header with positive locking, Dual Row, pitch 2mm, 28p; Part Number: 62402821622; Manufacturer: Wurth Elektronik; Pin Number: 28; Contact Resistance: 20mOhm; Rated Current: 3A; Withstanding Voltage: 1000VAC; Working Voltage: 250VAC; ComponentLink1Description: Datasheet; ComponentLink1URL: https://www.we-online.com/catalog/datasheet/62402821622.pdf; Pitch: 2mm; Packaging: Tube; Gender: Male; Type: Vertical; Supplier 1 URL: https://www.mouser.vn/ProductDetail/Wurth-Elektronik/62402821622?qs=E2PpAYvlWVv641KfY3U4Cg%3D%3D; Supplier 2 URL: N/A; Supplier 3 URL: N/A; Value: 2A, 125V(AC); LCSC Part #: N/A; Manufacturer Part Number: 62402821622; Mount: THT; Operating Temperature Max: + 85 C; Operating Temperature Min: - 25 C; Package / Case: 28; Supplier 1: Mouser; Supplier 1 Part Number: 710-62402821622; Supplier 2: Digi-Key; Supplier 2 Part Number: N/A; Supplier 3: thegioiic; Supplier 3 Part Number: N/A
footprint 62402821622
pins: 1, 2, 3, 4, 5, 6, 7, 8, 9, 10, 11, 12, 13, 14, 15, 16, 17, 18, 19, 20, 21, 22, 23, 24, 25, 26, 27, 28

## 62402821722
designator P?, comment 2A, 125V(AC)
WR-WTB THT Male Horizontal Shrouded Header with positive locking, Dual Row, pitch 2mm, 28p; Part Number: 62402821722; Manufacturer: Wurth Elektronik; Pin Number: 28; Contact Resistance: 20mOhm; Rated Current: 3A; Withstanding Voltage: 1000VAC; Working Voltage: 250VAC; ComponentLink1Description: Datasheet; ComponentLink1URL: https://www.we-online.com/catalog/datasheet/62402821722.pdf; Pitch: 2mm; Packaging: Tube; Gender: Male; Type: Horizontal; Supplier 1 URL: https://www.mouser.vn/ProductDetail/Wurth-Elektronik/62402821722?qs=E2PpAYvlWVv3ea%252BrjDfuiw%3D%3D; Supplier 2 URL: N/A; Supplier 3 URL: N/A; Value: 2A, 125V(AC); LCSC Part #: N/A; Manufacturer Part Number: 62402821722; Mount: THT; Operating Temperature Max: + 85 C; Operating Temperature Min: - 25 C; Package / Case: 28; Supplier 1: Mouser; Supplier 1 Part Number: 710-62402821722; Supplier 2: Digi-Key; Supplier 2 Part Number: N/A; Supplier 3: thegioiic; Supplier 3 Part Number: N/A
footprint 62402821722
pins: 1, 2, 3, 4, 5, 6, 7, 8, 9, 10, 11, 12, 13, 14, 15, 16, 17, 18, 19, 20, 21, 22, 23, 24, 25, 26, 27, 28

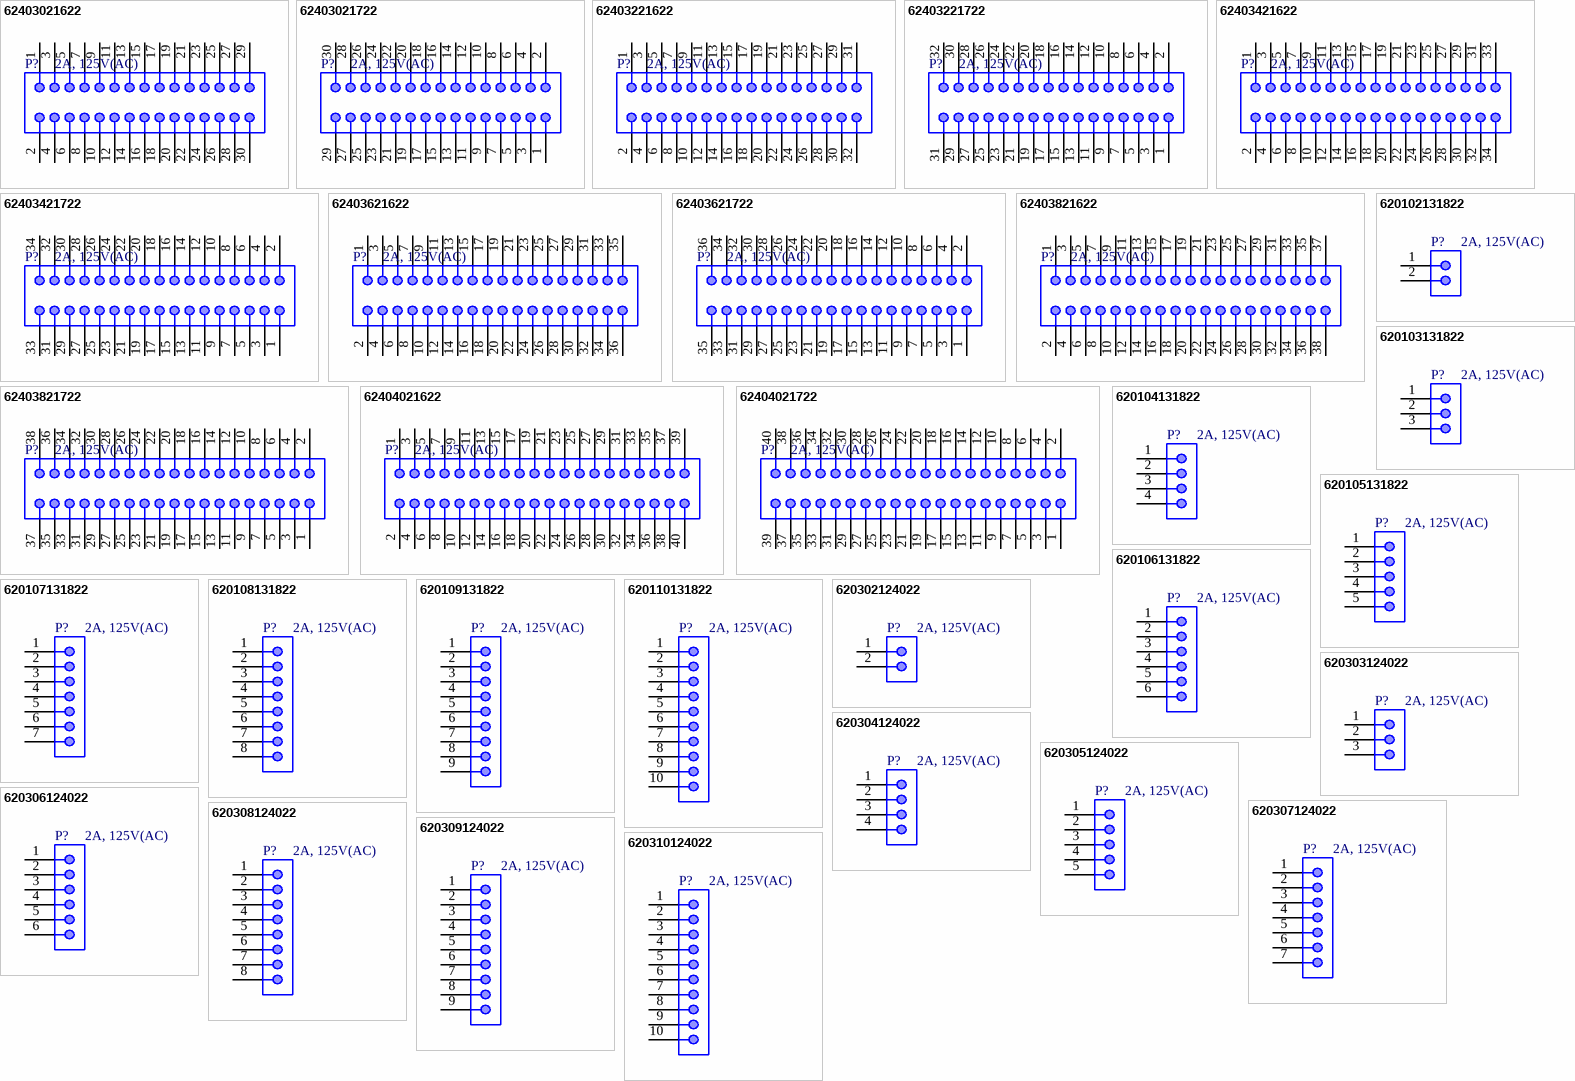
[diagram p3: symbols 62403021622 to 620310124022]

## 62403021622
designator P?, comment 2A, 125V(AC)
WR-WTB THT Male Vertical Shrouded Header with positive locking, Dual Row, pitch 2mm, 30p; Part Number: 62403021622; Manufacturer: Wurth Elektronik; Pin Number: 30; Contact Resistance: 20mOhm; Rated Current: 3A; Withstanding Voltage: 1000VAC; Working Voltage: 250VAC; ComponentLink1Description: Datasheet; ComponentLink1URL: https://www.we-online.com/catalog/datasheet/62403021622.pdf; Pitch: 2mm; Packaging: Tube; Gender: Male; Type: Vertical; Supplier 1 URL: https://www.mouser.vn/ProductDetail/Wurth-Elektronik/62403021622?qs=E2PpAYvlWVt5zQplzHgovA%3D%3D; Supplier 2 URL: N/A; Supplier 3 URL: N/A; Value: 2A, 125V(AC); LCSC Part #: N/A; Manufacturer Part Number: 62403021622; Mount: THT; Operating Temperature Max: + 85 C; Operating Temperature Min: - 25 C; Package / Case: 30; Supplier 1: Mouser; Supplier 1 Part Number: 710-62403021622; Supplier 2: Digi-Key; Supplier 2 Part Number: N/A; Supplier 3: thegioiic; Supplier 3 Part Number: N/A
footprint 62403021622
pins: 1, 2, 3, 4, 5, 6, 7, 8, 9, 10, 11, 12, 13, 14, 15, 16, 17, 18, 19, 20, 21, 22, 23, 24, 25, 26, 27, 28, 29, 30

## 62403021722
designator P?, comment 2A, 125V(AC)
WR-WTB THT Male Horizontal Shrouded Header with positive locking, Dual Row, pitch 2mm, 30p; Part Number: 62403021722; Manufacturer: Wurth Elektronik; Pin Number: 30; Contact Resistance: 20mOhm; Rated Current: 3A; Withstanding Voltage: 1000VAC; Working Voltage: 250VAC; ComponentLink1Description: Datasheet; ComponentLink1URL: https://www.we-online.com/catalog/datasheet/62403021722.pdf; Pitch: 2mm; Packaging: Tube; Gender: Male; Type: Horizontal; Supplier 1 URL: https://www.mouser.vn/ProductDetail/Wurth-Elektronik/62403021722?qs=E2PpAYvlWVtn05zHywk89g%3D%3D; Supplier 2 URL: N/A; Supplier 3 URL: N/A; Value: 2A, 125V(AC); LCSC Part #: N/A; Manufacturer Part Number: 62403021722; Mount: THT; Operating Temperature Max: + 85 C; Operating Temperature Min: - 25 C; Package / Case: 30; Supplier 1: Mouser; Supplier 1 Part Number: 710-62403021722; Supplier 2: Digi-Key; Supplier 2 Part Number: N/A; Supplier 3: thegioiic; Supplier 3 Part Number: N/A
footprint 62403021722
pins: 1, 2, 3, 4, 5, 6, 7, 8, 9, 10, 11, 12, 13, 14, 15, 16, 17, 18, 19, 20, 21, 22, 23, 24, 25, 26, 27, 28, 29, 30

## 62403221622
designator P?, comment 2A, 125V(AC)
WR-WTB THT Male Vertical Shrouded Header with positive locking, Dual Row, pitch 2mm, 32p; Part Number: 62403221622; Manufacturer: Wurth Elektronik; Pin Number: 32; Contact Resistance: 20mOhm; Rated Current: 3A; Withstanding Voltage: 1000VAC; Working Voltage: 250VAC; ComponentLink1Description: Datasheet; ComponentLink1URL: https://www.we-online.com/catalog/datasheet/62403221622.pdf; Pitch: 2mm; Packaging: Tube; Gender: Male; Type: Vertical; Supplier 1 URL: https://www.mouser.vn/ProductDetail/Wurth-Elektronik/62403221622?qs=2kOmHSv6VfTqmjxA2Zf7fA%3D%3D; Supplier 2 URL: N/A; Supplier 3 URL: N/A; Value: 2A, 125V(AC); LCSC Part #: N/A; Manufacturer Part Number: 62403221622; Mount: THT; Operating Temperature Max: + 85 C; Operating Temperature Min: - 25 C; Package / Case: 32; Supplier 1: Mouser; Supplier 1 Part Number: 710-62403221622; Supplier 2: Digi-Key; Supplier 2 Part Number: N/A; Supplier 3: thegioiic; Supplier 3 Part Number: N/A
footprint 62403221622
pins: 1, 2, 3, 4, 5, 6, 7, 8, 9, 10, 11, 12, 13, 14, 15, 16, 17, 18, 19, 20, 21, 22, 23, 24, 25, 26, 27, 28, 29, 30, 31, 32

## 62403221722
designator P?, comment 2A, 125V(AC)
WR-WTB THT Male Horizontal Shrouded Header with positive locking, Dual Row, pitch 2mm, 32p; Part Number: 62403221722; Manufacturer: Wurth Elektronik; Pin Number: 32; Contact Resistance: 20mOhm; Rated Current: 3A; Withstanding Voltage: 1000VAC; Working Voltage: 250VAC; ComponentLink1Description: Datasheet; ComponentLink1URL: https://www.we-online.com/catalog/datasheet/62403221722.pdf; Pitch: 2mm; Packaging: Tube; Gender: Male; Type: Horizontal; Supplier 1 URL: https://www.mouser.vn/ProductDetail/Wurth-Elektronik/62403221722?qs=E2PpAYvlWVtsAhmCM%252BjOAQ%3D%3D; Supplier 2 URL: N/A; Supplier 3 URL: N/A; Value: 2A, 125V(AC); LCSC Part #: N/A; Manufacturer Part Number: 62403221722; Mount: THT; Operating Temperature Max: + 85 C; Operating Temperature Min: - 25 C; Package / Case: 32; Supplier 1: Mouser; Supplier 1 Part Number: 710-62403221722; Supplier 2: Digi-Key; Supplier 2 Part Number: N/A; Supplier 3: thegioiic; Supplier 3 Part Number: N/A
footprint 62403221722
pins: 1, 2, 3, 4, 5, 6, 7, 8, 9, 10, 11, 12, 13, 14, 15, 16, 17, 18, 19, 20, 21, 22, 23, 24, 25, 26, 27, 28, 29, 30, 31, 32

## 62403421622
designator P?, comment 2A, 125V(AC)
WR-WTB THT Male Vertical Shrouded Header with positive locking, Dual Row, pitch 2mm, 34p; Part Number: 62403421622; Manufacturer: Wurth Elektronik; Pin Number: 34; Contact Resistance: 20mOhm; Rated Current: 3A; Withstanding Voltage: 1000VAC; Working Voltage: 250VAC; ComponentLink1Description: Datasheet; ComponentLink1URL: https://www.we-online.com/catalog/datasheet/62403421622.pdf; Pitch: 2mm; Packaging: Tube; Gender: Male; Type: Vertical; Supplier 1 URL: https://www.mouser.vn/ProductDetail/Wurth-Elektronik/62403421622?qs=E2PpAYvlWVtc1VgVK8vY4g%3D%3D; Supplier 2 URL: N/A; Supplier 3 URL: N/A; Value: 2A, 125V(AC); LCSC Part #: N/A; Manufacturer Part Number: 62403421622; Mount: THT; Operating Temperature Max: + 85 C; Operating Temperature Min: - 25 C; Package / Case: 34; Supplier 1: Mouser; Supplier 1 Part Number: 710-62403421622; Supplier 2: Digi-Key; Supplier 2 Part Number: N/A; Supplier 3: thegioiic; Supplier 3 Part Number: N/A
footprint 62403421622
pins: 1, 2, 3, 4, 5, 6, 7, 8, 9, 10, 11, 12, 13, 14, 15, 16, 17, 18, 19, 20, 21, 22, 23, 24, 25, 26, 27, 28, 29, 30, 31, 32, 33, 34

## 62403421722
designator P?, comment 2A, 125V(AC)
WR-WTB THT Male Horizontal Shrouded Header with positive locking, Dual Row, pitch 2mm, 34p; Part Number: 62403421722; Manufacturer: Wurth Elektronik; Pin Number: 34; Contact Resistance: 20mOhm; Rated Current: 3A; Withstanding Voltage: 1000VAC; Working Voltage: 250VAC; ComponentLink1Description: Datasheet; ComponentLink1URL: https://www.we-online.com/catalog/datasheet/62403421722.pdf; Pitch: 2mm; Packaging: Tube; Gender: Male; Type: Horizontal; Supplier 1 URL: https://www.mouser.vn/ProductDetail/Wurth-Elektronik/62403421722?qs=E2PpAYvlWVuzbyQa%252BDEmaQ%3D%3D; Supplier 2 URL: N/A; Supplier 3 URL: N/A; Value: 2A, 125V(AC); LCSC Part #: N/A; Manufacturer Part Number: 62403421722; Mount: THT; Operating Temperature Max: + 85 C; Operating Temperature Min: - 25 C; Package / Case: 34; Supplier 1: Mouser; Supplier 1 Part Number: 710-62403421722; Supplier 2: Digi-Key; Supplier 2 Part Number: N/A; Supplier 3: thegioiic; Supplier 3 Part Number: N/A
footprint 62403421722
pins: 1, 2, 3, 4, 5, 6, 7, 8, 9, 10, 11, 12, 13, 14, 15, 16, 17, 18, 19, 20, 21, 22, 23, 24, 25, 26, 27, 28, 29, 30, 31, 32, 33, 34